# EAGLE library part MSD (library card_dac_3d)
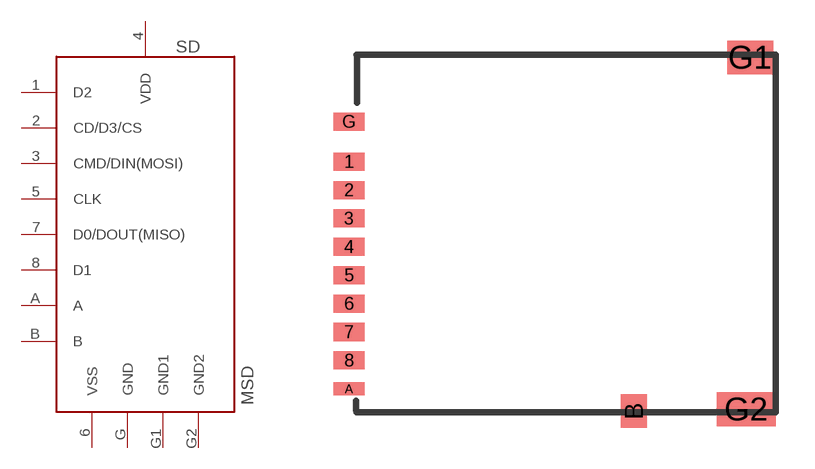
[diagram p1: symbol with the pads of DM3AT; footprint DM3AT]

Designator prefix SD

## MSDDM3AT  [DM3AT]
1  D2
2  CD/D3/CS
3  CMD/DIN(MOSI)
4  VDD  pwr
5  CLK
6  VSS  sup
7  D0/DOUT(MISO)
8  D1
A  A
B  B
G  GND  sup
G1  GND1  sup
G2  GND2  sup

## Footprint DM3AT (pad centres in mm)
smd 1.2 x 0.7: 1 -5.046,7.7; 2 -5.046,6.6; 3 -5.046,5.5; 4 -5.046,4.4; 5 -5.046,3.3; 6 -5.046,2.2; 7 -5.046,1.1; 8 -5.046,0; G -5.046,9.25
smd 1.2 x 0.5: A -5.046,-1.1
smd 1 x 1.3: B 6,-1.96
smd 1.778 x 1.3: G1 10.507,11.737
smd 2.286 x 1.3: G2 10.358,-1.893